# Altium integrated library BZX84C3V6RFG.IntLib: 1 symbol
Pins are listed as number, name and electrical type; pins without a type are passive.

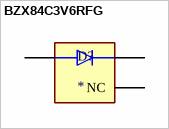
[diagram p0: symbol BZX84C3V6RFG]

## BZX84C3V6RFG
designator D?
Diode Zener Single 3.6V 5% 0.3W 3-Pin SOT-23 Plastic T/R; MF: Taiwan Semiconductor; MP: BZX84C3V6RFG; SnapEDA_Link: https://www.snapeda.com/parts/BZX84C3V6RFG/taiwan/view-part/?ref=snap; Package: SOT-23 Taiwan Semiconductor; Value: *; Check_prices: https://www.snapeda.com/parts/BZX84C3V6RFG/taiwan/view-part/?ref=eda
footprint SOT95P237X112-3N
pins: 1 A, 2 NC, 3 K